# Altium schematic symbol library Schlib1.SchLib: 10 symbols
Pins are listed as number, name and electrical type; pins without a type are passive.

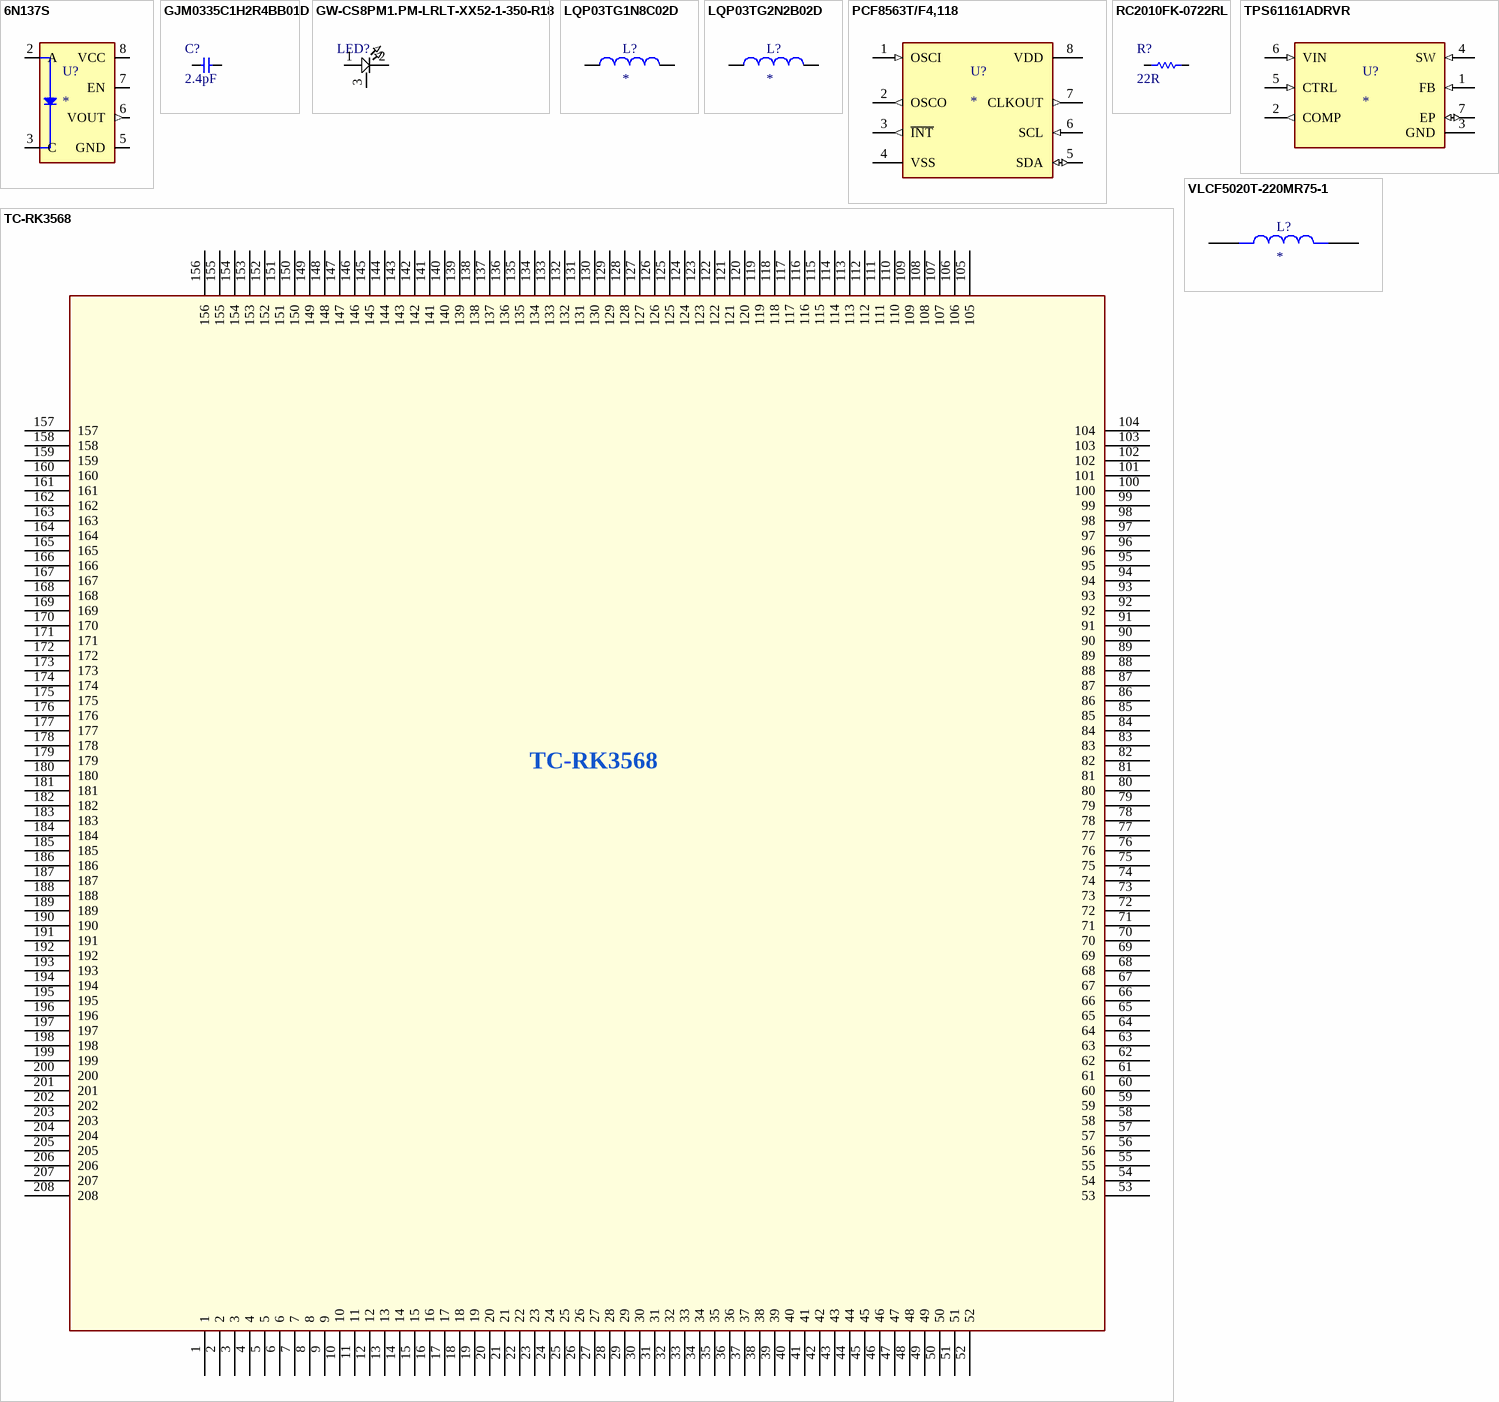
[diagram p0: symbols 6N137S to VLCF5020T-220MR75-1]

## 6N137S
designator U?
Logic Output Optoisolator 15MBd Open Collector 5000Vrms 1 Channel 10kV/Âµs CMTI 8-SMD; MF: Lite-On Electronics; MP: 6N137S; SnapEDA_Link: https://www.snapeda.com/parts/6N137S/Applied+Avionics/view-part/?ref=snap; Package: SMD-8 Lite-On Inc.; Value: *; Check_prices: https://www.snapeda.com/parts/6N137S/Applied+Avionics/view-part/?ref=eda
footprint 8-SMD
pins: 2 A (io), 3 C (io), 5 GND (power), 6 VOUT (out), 7 EN (io), 8 VCC (power)

## GJM0335C1H2R4BB01D
designator C?, comment 2.4pF
CAP CER 2.4pF 0201
pins: 1, 2

## GW-CS8PM1.PM-LRLT-XX52-1-350-R18
designator LED?, comment WHITE  (value not drawn)
White LED 350mA Cool 5700K 80° 1212
pins: 1, 2, 3

## LQP03TG1N8C02D
designator L?
0201 (0603) 1.8NH 0.2NH 500MA 0.; MP: LQP03TG1N8C02D; Package: None; Price: None; Value: *; Availability: Unavailable
footprint INDC0603X33N
pins: 1, 2

## LQP03TG2N2B02D
designator L?
FIXED IND 2.2NH 450MA 250 MOHM; MP: LQP03TG2N2B02D; Package: None; Price: None; Value: *; Availability: Unavailable
footprint INDC0603X33N
pins: 1, 2

## PCF8563T/F4,118
designator U?
Real Time Clock (RTC) IC Clock/Calendar IÂ²C, 2-Wire Serial 8-SOIC (0.154, 3.90mm Width); MF: NXP USA; MP: PCF8563T/F4,118; Value: *; Price: None; Check_prices: https://www.snapeda.com/parts/PCF8563T/F4,118/NXP%20USA%20Inc./view-part/32409/?ref=eda; Purchase-URL: https://pricing.snapeda.com/search/part/PCF8563T/F4,118/?ref=eda; SnapEDA_Link: https://www.snapeda.com/parts/PCF8563T/F4,118/NXP%20USA%20Inc./view-part/32409/?ref=snap; Package: SOIC-8 NXP Semiconductors; Availability: Good
footprint SOIC127P600X175-8N
pins: 1 OSCI (in), 2 OSCO (out), 3 ~{INT} (out), 4 VSS (power), 5 SDA (io), 6 SCL (in), 7 CLKOUT (out), 8 VDD (power)

## RC2010FK-0722RL
designator R?, comment 22R
RES 22 OHM 1% 750mW 2010
pins: 1, 2

## TC-RK3568
designator M?
pins: 1 "VCC3V3_SYS", 2, 3, 4, 5, 6, 7, 8, 9, 10, 11, 12, 13, 14, 15, 16, 17, 18, 19, 20, 21, 22, 23, 24, 25, 26, 27, 28, 29, 30, 31, 32, 33, 34, 35, 36, 37, 38, 39, 40, 41, 42, 43, 44, 45, 46, 47, 48, 49, 50, 51, 52, 53, 54, 55, 56, 57, 58, 59, 60, 61, 62, 63, 64, 65, 66, 67, 68, 69, 70, 71, 72, 73, 74, 75, 76, 77, 78, 79, 80, 81, 82, 83, 84, 85, 86, 87, 88, 89, 90, 91, 92, 93, 94, 95, 96, 97, 98, 99, 100, 101, 102, 103, 104, 105, 106, 107, 108, 109, 110, 111, 112, 113, 114, 115, 116, 117, 118, 119, 120, 121, 122, 123, 124, 125, 126, 127, 128, 129, 130, 131, 132, 133, 134, 135, 136, 137, 138, 139, 140, 141, 142, 143, 144, 145, 146, 147, 148, 149, 150, 151, 152, 153, 154, 155, 156, 157, 158, 159, 160, 161, 162, 163, 164, 165, 166, 167, 168, 169, 170, 171, 172, 173, 174, 175, 176, 177, 178, 179, 180, 181, 182, 183, 184, 185, 186, 187, 188, 189, 190, 191, 192, 193, 194, 195, 196, 197, 198, 199, 200, 201, 202, 203, 204, 205, 206, 207, 208

## TPS61161ADRVR
designator U?
White LED driver with PWM brightness control in 2mm x 2mm WSON Package. up to 10 LEDs in Series 6-WSON -40 to 85; MF: Texas Instruments; MP: TPS61161ADRVR; SnapEDA_Link: https://www.snapeda.com/parts/TPS61161ADRVR/Texas%20Instruments/view-part/287925/?ref=snap; Package: WSON-6 Texas Instruments; Purchase-URL: https://pricing.snapeda.com/search/part/TPS61161ADRVR/?ref=eda; Price: None; Value: *; Check_prices: https://www.snapeda.com/parts/TPS61161ADRVR/Texas%20Instruments/view-part/287925/?ref=eda; Availability: Warning
footprint SON65P200X200X80-7N
pins: 1 FB (in), 2 COMP (out), 3 GND (power), 4 SW (in), 5 CTRL (in), 6 VIN (in), 7 EP (io)

## VLCF5020T-220MR75-1
designator L?
SMD / SMT Inductor (Coil), 2.2 - 47 H, 100 kHz, 0.71 - 2.76 A, 58 - 875 Ohm, 5 x 5 x 2 (LxWxH); MP: VLCF5020T-220MR75-1; MF: TDK; Value: *; Availability: In Stock; Package: NON STANDARD-2 TDK; Purchase-URL: https://pricing.snapeda.com/search/part/VLCF5020T-220MR75-1/?ref=eda; SnapEDA_Link: https://www.snapeda.com/parts/VLCF5020T-220MR75-1/TDK/view-part/?ref=snap; Check_prices: https://www.snapeda.com/parts/VLCF5020T-220MR75-1/TDK/view-part/?ref=eda; Price: None
footprint IND_VLCF5020T-220MR75-1
pins: 1, 2